# Altium footprint library PcbLib1.PcbLib: 335 footprints (part 5 of 22)
Each footprint in its own frame and in the unit in brackets; x right, y up, seen from the top. Pads: shape width x height; smd on the part's side, far side on the other; paste and mask are expansions set on the pad; w line width, h text height; cw(c..) or ccw(c..) is an arc to the next point about the centre after c.
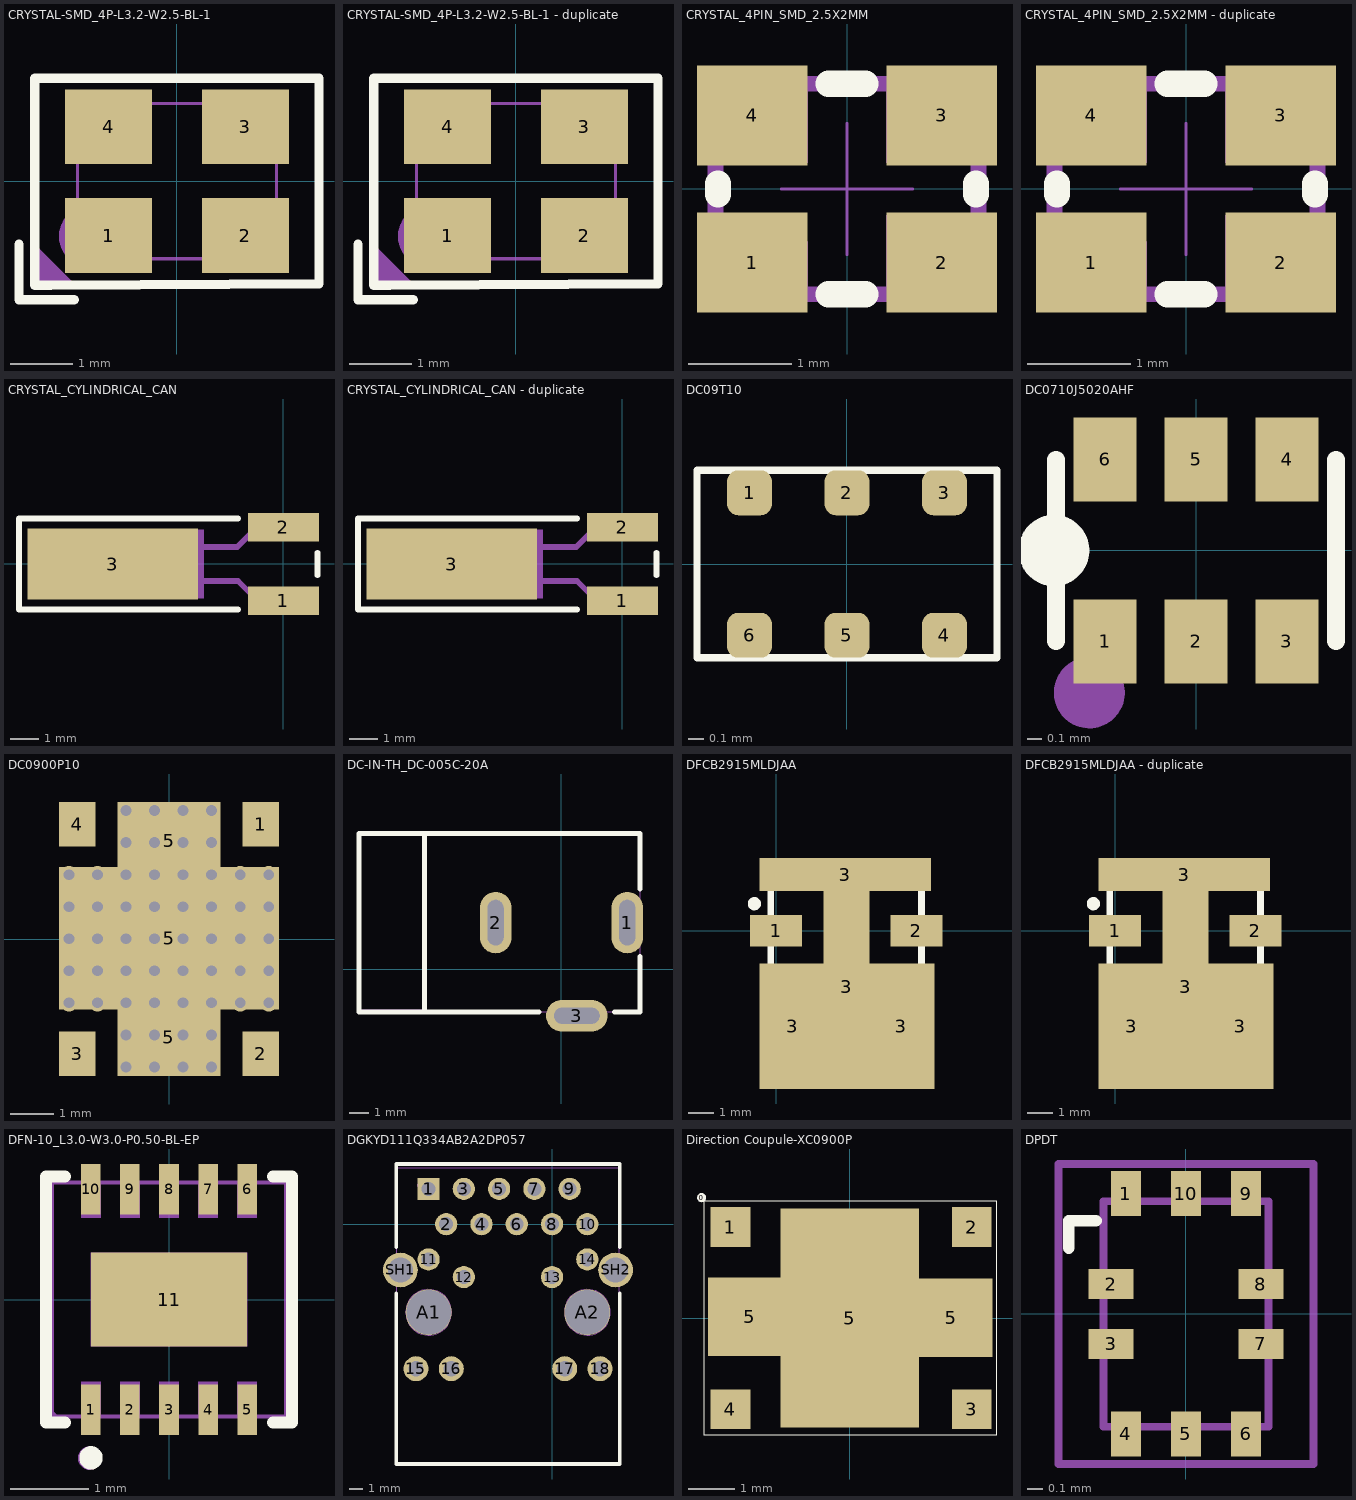
[diagram p4: the footprints below, top view; thin cyan lines are the x and y axes]

## CRYSTAL-SMD_4P-L3.2-W2.5-BL-1 [mm]
pads (4):
  rect 1.4x1.2 smd mask+0.051: 1(-1.1,-0.875) 2(1.1,-0.875) 3(1.1,0.875) 4(-1.1,0.875)
Top Overlay:
  lines w0.152: -2.54,-1.016 -2.54,-1.778 -2.54,-1.905 -1.651,-1.905 ; -2.286,-1.679 -2.03,-1.679 2.286,-1.651 2.286,0 2.286,1.651 -2.286,1.651 -2.286,-1.679
Mechanical 6:
  circle w0.5: c-1.397,-0.889 r0.25
  region: -2.286,-1.016 -2.286,-1.651 -1.651,-1.651
Mechanical 15:
  region: -1.54,-1.25 -1.54,-1.225 -1.575,-1.19 -1.625,-1.19 -1.66,-1.225 -1.66,-1.25 -1.66,-1.275 -1.625,-1.31 -1.575,-1.31 -1.54,-1.275 -1.54,-1.25
  region: 0.45,-0.35 1.5,-0.35 1.5,-1.15 0.45,-1.15
  region: -1.5,-0.35 -0.45,-0.35 -0.45,-1.15 -1.5,-1.15
  region: -1.5,1.15 -0.45,1.15 -0.45,0.35 -1.5,0.35
  region: 0.45,1.15 1.5,1.15 1.5,0.35 0.45,0.35
  lines w0.051: -1.6,-1.25 -1.6,1.25 1.6,1.25 1.6,-1.25 -1.6,-1.25

## CRYSTAL-SMD_4P-L3.2-W2.5-BL-1 - duplicate [mm]
pads (4):
  rect 1.4x1.2 smd mask+0.051: 1(-1.1,-0.875) 2(1.1,-0.875) 3(1.1,0.875) 4(-1.1,0.875)
Top Overlay:
  lines w0.152: -2.54,-1.016 -2.54,-1.778 -2.54,-1.905 -1.651,-1.905 ; -2.286,-1.679 -2.286,1.651 2.286,1.651 2.286,0 2.286,-1.651 -2.03,-1.679 -2.286,-1.679
Mechanical 6:
  circle w0.5: c-1.397,-0.889 r0.25
  region: -2.286,-1.016 -2.286,-1.651 -1.651,-1.651
Mechanical 15:
  region: 0.45,1.15 1.5,1.15 1.5,0.35 0.45,0.35
  region: -1.5,1.15 -0.45,1.15 -0.45,0.35 -1.5,0.35
  region: -1.5,-0.35 -0.45,-0.35 -0.45,-1.15 -1.5,-1.15
  region: 0.45,-0.35 1.5,-0.35 1.5,-1.15 0.45,-1.15
  region: -1.54,-1.25 -1.54,-1.225 -1.575,-1.19 -1.625,-1.19 -1.66,-1.225 -1.66,-1.25 -1.66,-1.275 -1.625,-1.31 -1.575,-1.31 -1.54,-1.275 -1.54,-1.25
  lines w0.051: -1.6,-1.25 1.6,-1.25 1.6,1.25 -1.6,1.25 -1.6,-1.25

## CRYSTAL_4PIN_SMD_2.5X2MM [mil]
pads (4):
  rect 42x38 smd: 1(-36,-28) 2(36,-28) 3(36,28) 4(-36,28)
Top Overlay:
  lines w10: -49,-2 -49,2 ; -7,-40 7,-40 ; -7,40 7,40 ; 49,-2 49,2
Mechanical 1:
  region: -50,40 -15,40 -15,10 -50,10
  region: 50,40 15,40 15,10 50,10
  region: 50,-40 15,-40 15,-10 50,-10
  region: -50,-10 -50,-40 -15,-40 -15,-20 -25,-10
  lines w6: -50,-40 -50,40 50,40 50,-40 -50,-40
Mechanical 16:
  lines w1: -25,0 25,0 ; 0,-25 0,25

## CRYSTAL_4PIN_SMD_2.5X2MM - duplicate [mil]
pads (4):
  rect 42x38 smd: 1(-36,-28) 2(36,-28) 3(36,28) 4(-36,28)
Top Overlay:
  lines w10: -49,-2 -49,2 ; -7,-40 7,-40 ; -7,40 7,40 ; 49,-2 49,2
Mechanical 1:
  region: -50,-10 -50,-40 -15,-40 -15,-20 -25,-10
  region: 50,-40 15,-40 15,-10 50,-10
  region: 50,40 15,40 15,10 50,10
  region: -50,40 -15,40 -15,10 -50,10
  lines w6: -50,-40 50,-40 50,40 -50,40 -50,-40
Mechanical 16:
  lines w1: -25,0 25,0 ; 0,-25 0,25

## CRYSTAL_CYLINDRICAL_CAN [mm]
pads (3):
  rect 2.5x1 smd paste-0.25 mask+0.1: 1(0,-1.285) 2(0,1.285)
  rect 6x2.5 smd paste-0.5 mask+0.1: 3(-6,0)
Top Overlay:
  lines w0.2: -1.6,-1.6 -9.3,-1.6 -9.3,1.6 -1.6,1.6 ; 1.2,-0.4 1.2,0.4
Mechanical 1:
  region: -8.8,1 -3.2,1 -3.2,-1 -8.8,-1
  region: -4.8,1.2 -2.8,1.2 -2.8,-1.2 -4.8,-1.2
  lines w0.2: -3,-0.6 -1.6,-0.6 -0.9,-1.3 0.8,-1.3 ; -3,0.6 -1.625,0.6 -0.925,1.3 0.8,1.3

## CRYSTAL_CYLINDRICAL_CAN - duplicate [mm]
pads (3):
  rect 2.5x1 smd paste-0.25 mask+0.1: 1(0,-1.285) 2(0,1.285)
  rect 6x2.5 smd paste-0.5 mask+0.1: 3(-6,0)
Top Overlay:
  lines w0.2: -1.6,-1.6 -9.3,-1.6 -9.3,1.6 -1.6,1.6 ; 1.2,-0.4 1.2,0.4
Mechanical 1:
  region: -8.8,1 -3.2,1 -3.2,-1 -8.8,-1
  region: -4.8,1.2 -2.8,1.2 -2.8,-1.2 -4.8,-1.2
  lines w0.2: -3,-0.6 -1.6,-0.6 -0.9,-1.3 0.8,-1.3 ; -3,0.6 -1.625,0.6 -0.925,1.3 0.8,1.3

## DC09T10 [mm]
pads (6):
  rrect50% 0.3x0.3 smd: 1(-0.65,0.475) 2(0,0.475) 3(0.65,0.475) 4(0.65,-0.475) 5(0,-0.475) 6(-0.65,-0.475)
Top Overlay:
  lines w0.05: -1,-0.625 -1,0.625 1,0.625 1,-0.625 -1,-0.625

## DC0710J5020AHF [mm] "coupler"
pads (6):
  rect 0.45x0.6 smd: 1(-0.65,-0.65) 2(0,-0.65) 3(0.65,-0.65) 4(0.65,0.65) 5(0,0.65) 6(-0.65,0.65)
Top Overlay:
  circle w0.254: c-1.016,0 r0.127
  lines w0.127: -1,-0.647 -1,0.648 ; 1,-0.647 1,0.648
Mechanical 15:
  circle w0.254: c-0.762,-1.016 r0.127

## DC0900P10 [mm]
pads (7):
  rect 0.84x1.034 smd mask+0: 1(2.123,2.674) 3(-2.137,-2.662) 4(-2.137,2.674)
  rect 0.84x1.032 smd mask+0: 2(2.123,-2.663)
  rect 2.4x1.8 smd mask+0: 5(-0.007,-2.279) 5(-0.007,2.291)
  rect 5.1x3.31 smd mask+0: 5(-0.007,0.018)
via 2.309,-1.478 diameter 0.4 hole 0.25
via 2.309,-0.733 diameter 0.4 hole 0.25
via 2.309,0.011 diameter 0.4 hole 0.25
via 2.309,0.756 diameter 0.4 hole 0.25
via 2.309,1.501 diameter 0.4 hole 0.25
via 1.646,-1.478 diameter 0.4 hole 0.25
via 1.646,-0.733 diameter 0.4 hole 0.25
via 1.646,0.011 diameter 0.4 hole 0.25
via 1.646,0.756 diameter 0.4 hole 0.25
via 1.646,1.501 diameter 0.4 hole 0.25
via -2.33,1.501 diameter 0.4 hole 0.25
via -2.33,0.756 diameter 0.4 hole 0.25
via -2.33,0.011 diameter 0.4 hole 0.25
via -2.33,-0.733 diameter 0.4 hole 0.25
via -2.33,-1.478 diameter 0.4 hole 0.25
via -1.667,1.501 diameter 0.4 hole 0.25
via -1.667,0.756 diameter 0.4 hole 0.25
via -1.667,0.011 diameter 0.4 hole 0.25
via -1.667,-0.733 diameter 0.4 hole 0.25
via -1.667,-1.478 diameter 0.4 hole 0.25
via 0.984,2.99 diameter 0.4 hole 0.25
via 0.984,2.245 diameter 0.4 hole 0.25
via 0.984,1.501 diameter 0.4 hole 0.25
via 0.984,0.756 diameter 0.4 hole 0.25
via 0.984,0.011 diameter 0.4 hole 0.25
via 0.321,2.99 diameter 0.4 hole 0.25
via -0.342,2.99 diameter 0.4 hole 0.25
via -1.004,2.99 diameter 0.4 hole 0.25
via 0.984,-0.733 diameter 0.4 hole 0.25
via 0.984,-1.478 diameter 0.4 hole 0.25
via 0.984,-2.222 diameter 0.4 hole 0.25
via 0.984,-2.967 diameter 0.4 hole 0.25
via 0.321,2.245 diameter 0.4 hole 0.25
via 0.321,1.501 diameter 0.4 hole 0.25
via 0.321,0.756 diameter 0.4 hole 0.25
via 0.321,0.011 diameter 0.4 hole 0.25
via 0.321,-0.733 diameter 0.4 hole 0.25
via 0.321,-1.478 diameter 0.4 hole 0.25
via 0.321,-2.222 diameter 0.4 hole 0.25
via 0.321,-2.967 diameter 0.4 hole 0.25
via -0.342,2.245 diameter 0.4 hole 0.25
via -0.342,1.501 diameter 0.4 hole 0.25
via -0.342,0.756 diameter 0.4 hole 0.25
via -0.342,0.011 diameter 0.4 hole 0.25
via -0.342,-0.733 diameter 0.4 hole 0.25
via -0.342,-1.478 diameter 0.4 hole 0.25
via -0.342,-2.222 diameter 0.4 hole 0.25
via -0.342,-2.967 diameter 0.4 hole 0.25
via -1.004,2.245 diameter 0.4 hole 0.25
via -1.004,1.501 diameter 0.4 hole 0.25
via -1.004,0.756 diameter 0.4 hole 0.25
via -1.004,0.011 diameter 0.4 hole 0.25
via -1.004,-0.733 diameter 0.4 hole 0.25
via -1.004,-1.478 diameter 0.4 hole 0.25
via -1.004,-2.222 diameter 0.4 hole 0.25
via -1.004,-2.967 diameter 0.4 hole 0.25

## DC-IN-TH_DC-005C-20A [mm]
pads (3):
  oval 1.6x3.1 hole 0.8 slot 2.3 at 90 deg paste-2539.97 mask+0.051: 1(3.325,2.35)
  oval 1.6x3.1 hole 0.8 slot 2.3 at 90 deg copper offset 0,0.001 paste-2539.97 mask+0.051: 2(-3.324,2.35)
  oval 3.1x1.6 hole 0.8 slot 2.3 at 0 deg copper offset 0,-0.001 paste-2539.97 mask+0.051: 3(0.775,-2.349)
Top Overlay:
  lines w0.254: -10.225,6.85 3.975,6.85 ; -10.225,-2.15 -10.225,6.85 ; -10.225,-2.149 -1.125,-2.15 ; -6.925,-2.146 -6.925,6.845 ; -6.923,-2.146 -6.923,6.845 ; 2.675,-2.15 3.975,-2.15 3.975,0.649 ; 3.975,4.05 3.975,6.849
Mechanical 6:
  region: -6.725,6.95 -10.225,6.95 -10.275,6.9 -10.275,-2.2 -10.225,-2.25 -6.825,-2.25 -6.825,-2.05 -10.125,-2.05 -10.125,6.75 -6.725,6.75
Mechanical 15:
  region: -0.225,-2.5 1.775,-2.5 1.775,-2.1 -0.225,-2.1
  region: -3.45,1.85 -3.45,2.85 -3.2,2.85 -3.2,1.85
  region: 0.275,-2.2 1.275,-2.2 1.275,-2.5 0.275,-2.5
  region: 3.175,1.85 3.175,2.85 3.475,2.85 3.475,1.85
  region: 4.035,6.85 4.035,6.875 4,6.91 3.95,6.91 3.915,6.875 3.915,6.85 3.915,6.825 3.95,6.79 4,6.79 4.035,6.825 4.035,6.85
  lines w0.051: -10.225,-2.15 3.975,-2.15 3.975,6.85 -10.225,6.85 -10.225,-2.15

## DFCB2915MLDJAA [mil]
pads (6):
  rect 78.74x47.24 smd: 1(0,0) 2(212.6,0)
  rect 100x190 smd: 3(25,-145) 3(190,-145)
  rect 260x50 smd: 3(105,85)
  rect 70x310 smd: 3(107,-85)
Top Overlay:
  circle w10: c-33,41 r5
  lines w10: -7.87,-226.38 -7.87,96.46 220.47,96.46 220.47,-226.38 -7.87,-226.38

## DFCB2915MLDJAA - duplicate [mil]
pads (6):
  rect 78.74x47.24 smd: 1(0,0) 2(212.6,0)
  rect 100x190 smd: 3(25,-145) 3(190,-145)
  rect 260x50 smd: 3(105,85)
  rect 70x310 smd: 3(107,-85)
Top Overlay:
  circle w10: c-33,41 r5
  lines w10: -7.87,-226.38 -7.87,96.46 220.47,96.46 220.47,-226.38 -7.87,-226.38

## DFN-10_L3.0-W3.0-P0.50-BL-EP [mm]
pads (11):
  rect 0.25x0.65 smd paste+0 mask+0.051: 1(-1,-1.411) 2(-0.5,-1.411) 3(0,-1.411) 4(0.5,-1.411) 5(1,-1.411) 6(1,1.411) 7(0.5,1.411) 8(0,1.411) 9(-0.5,1.411) 10(-1,1.411)
  rect 2x1.2 smd paste+0 mask+0.051: 11(0,0)
Top Overlay:
  circle w0.15: c-1,-2.028 r0.075
  lines w0.152: -1.331,-1.576 -1.576,-1.576 -1.576,1.576 -1.331,1.576 ; 1.331,-1.576 1.576,-1.576 1.576,1.576 1.331,1.576
Mechanical 6:
  circle w0.15: c-1.016,-2.032 r0.075
Mechanical 15:
  region: 0.875,1.05 0.875,1.5 1.125,1.5 1.125,1.05
  region: 0.375,1.05 0.375,1.5 0.625,1.5 0.625,1.05
  region: -0.125,1.05 -0.125,1.5 0.125,1.5 0.125,1.05
  region: -0.625,1.05 -0.625,1.5 -0.375,1.5 -0.375,1.05
  region: -1.125,1.05 -1.125,1.5 -0.875,1.5 -0.875,1.05
  region: -1.125,-1.5 -1.125,-1.05 -0.875,-1.05 -0.875,-1.5
  region: -0.625,-1.5 -0.625,-1.05 -0.375,-1.05 -0.375,-1.5
  region: -0.125,-1.5 -0.125,-1.05 0.125,-1.05 0.125,-1.5
  region: 0.375,-1.5 0.375,-1.05 0.625,-1.05 0.625,-1.5
  region: 0.875,-1.5 0.875,-1.05 1.125,-1.05 1.125,-1.5
  region: -1,0.6 1,0.6 1,-0.6 -1,-0.6
  region: -1.44,-1.5 -1.44,-1.475 -1.475,-1.44 -1.525,-1.44 -1.56,-1.475 -1.56,-1.5 -1.56,-1.525 -1.525,-1.56 -1.475,-1.56 -1.44,-1.525 -1.44,-1.5
  lines w0.051: -1.5,-1.5 1.5,-1.5 1.5,1.5 -1.5,1.5 -1.5,-1.5

## DGKYD111Q334AB2A2DP057 [mm]
pads (23):
  rect 1.6x1.6 hole 1 paste-2539.97 mask+0.051: 1(-8.89,2.54)
  round 1.6 hole 1 paste-2539.97 mask+0.051: 2(-7.62,0) 3(-6.35,2.54) 4(-5.08,0) 5(-3.81,2.54) 6(-2.54,0) 7(-1.27,2.54) 8(0,0) 9(1.27,2.54) 10(2.54,0) 11(-8.89,-2.54) 12(-6.35,-3.81) 13(0,-3.81) 14(2.54,-2.54)
  rrect50% 0x0 smd mask+0.102: 8(-5.461,-6.604)
  round 1.8 hole 1.1 paste-2539.97 mask+0.051: 15(-9.795,-10.41) 16(-7.255,-10.41) 17(0.915,-10.41) 18(3.455,-10.41)
  round 3.3 hole 3.2 paste-2539.97 mask+0.051: A1(-8.89,-6.35) A2(2.54,-6.35)
  round 2.5 hole 1.8 paste-2539.97 mask+0.051: SH1(-10.915,-3.3) SH2(4.575,-3.3)
Top Overlay:
  lines w0.254: -11.22,-4.97 -11.22,-17.27 4.88,-17.27 4.88,-4.97 ; -11.22,-1.67 -11.22,4.33 4.88,4.33 4.881,-1.67
Mechanical 1:
  circle w0.005: c-8.885,-6.35 r1.65
  circle w0.005: c2.545,-6.35 r1.65
Mechanical 6:
  circle w0.2: c-9.525,2.794 r0.1
  circle w1.4: c-8.885,-6.35 r0.7
  circle w1.4: c2.545,-6.35 r0.7
Mechanical 15:
  region: -11.13,4.05 -11.13,4.075 -11.165,4.11 -11.215,4.11 -11.25,4.075 -11.25,4.05 -11.25,4.025 -11.215,3.99 -11.165,3.99 -11.13,4.025 -11.13,4.05
  region: 0.97,2.69 1.57,2.69 1.57,2.39 0.97,2.39
  region: -0.3,0.15 0.3,0.15 0.3,-0.15 -0.3,-0.15
  region: -1.57,2.69 -0.97,2.69 -0.97,2.39 -1.57,2.39
  region: -2.84,0.15 -2.24,0.15 -2.24,-0.15 -2.84,-0.15
  region: -4.11,2.69 -3.51,2.69 -3.51,2.39 -4.11,2.39
  region: -5.38,0.15 -4.78,0.15 -4.78,-0.15 -5.38,-0.15
  region: -6.65,2.69 -6.05,2.69 -6.05,2.39 -6.65,2.39
  region: -9.617,2.563 -9.017,2.563 -9.017,2.263 -9.617,2.263
  region: -10.095,-10.11 -9.495,-10.11 -9.495,-10.41 -10.095,-10.41
  region: -7.539,-10.16 -6.939,-10.16 -6.939,-10.46 -7.539,-10.46
  region: 0.615,-10.11 1.215,-10.11 1.215,-10.41 0.615,-10.41
  region: 3.155,-10.11 3.755,-10.11 3.755,-10.41 3.155,-10.41
  region: 4.55,-3.9 4.55,-2.7 4.85,-2.7 4.85,-3.9
  region: -11.19,-3.9 -11.19,-2.7 -10.89,-2.7 -10.89,-3.9
  lines w0.051: -11.19,-17.25 -11.19,4.05 4.85,4.05 4.85,-17.25 -11.19,-17.25

## Direction Coupule-XC0900P [mm]
height 1.35
pads (8):
  round 0.2 on Top Overlay: 0(-3.21,2.61)
  rect 0.86x0.86 smd: 1(-2.585,1.973) 2(2.64,1.973) 3(2.64,-1.977) 4(-2.585,-1.977)
  rect 1.8x1.7 smd: 5(-2.172,0.034) 5(2.197,0.008)
  rect 3x4.75 smd: 5(0,0)
Top Overlay:
  lines w0.025: -3.16,-2.532 -3.16,2.548 3.19,2.548 3.19,-2.532 -3.16,-2.532
3D body "Directional Coupler-X3C09P2-30S.STEP": height 2.1, standoff -0.02, extent -3.175,-2.54 3.175,2.54

## DPDT [mil] "AW12022TQNR"
pads (10):
  rect 7.9x11.8 smd mask+1.97: 1(-15.7,31.5) 4(-15.7,-31.5) 5(0,-31.5) 6(15.8,-31.5) 9(15.8,31.5) 10(0,31.5)
  rect 11.8x7.9 smd mask+1.97: 2(-19.6,7.8) 3(-19.6,-7.9) 7(19.7,-7.9) 8(19.7,7.8)
Top Overlay:
  lines w3.1: -30.7,17.3 -30.7,24.4 -23.6,24.4
Mechanical 4:
  lines w2: -21.6,-29.6 -21.6,29.5 21.7,29.5 21.7,-29.6 -21.6,-29.6
Mechanical 6:
  lines w2: -33.4,-39.4 -33.4,39.3 33.5,39.3 33.5,-39.4 -33.4,-39.4